# Altium schematic symbol library RC0603FR-07100KL.SchLib: 1 symbol
Pins are listed as number, name and electrical type; pins without a type are passive.

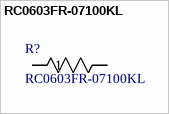
[diagram p0: symbol RC0603FR-07100KL]

## RC0603FR-07100KL
designator R?
RES, 100 k, 1%, 0.1 W, 0603; Manufacturer_Name: Yageo; Copyright: Copyright (C) 2025 Ultra Librarian. All rights reserved.; Manufacturer_Part_Number: RC0603FR-07100KL
footprint RC0603N_YAG
pins: 1, 2